# Altium footprint library TitansLib.PcbLib: 333 footprints (part 15 of 21)
Each footprint in its own frame and in the unit in brackets; x right, y up, seen from the top. Pads: shape width x height; smd on the part's side, far side on the other; paste and mask are expansions set on the pad; w line width, h text height; cw(c..) or ccw(c..) is an arc to the next point about the centre after c.
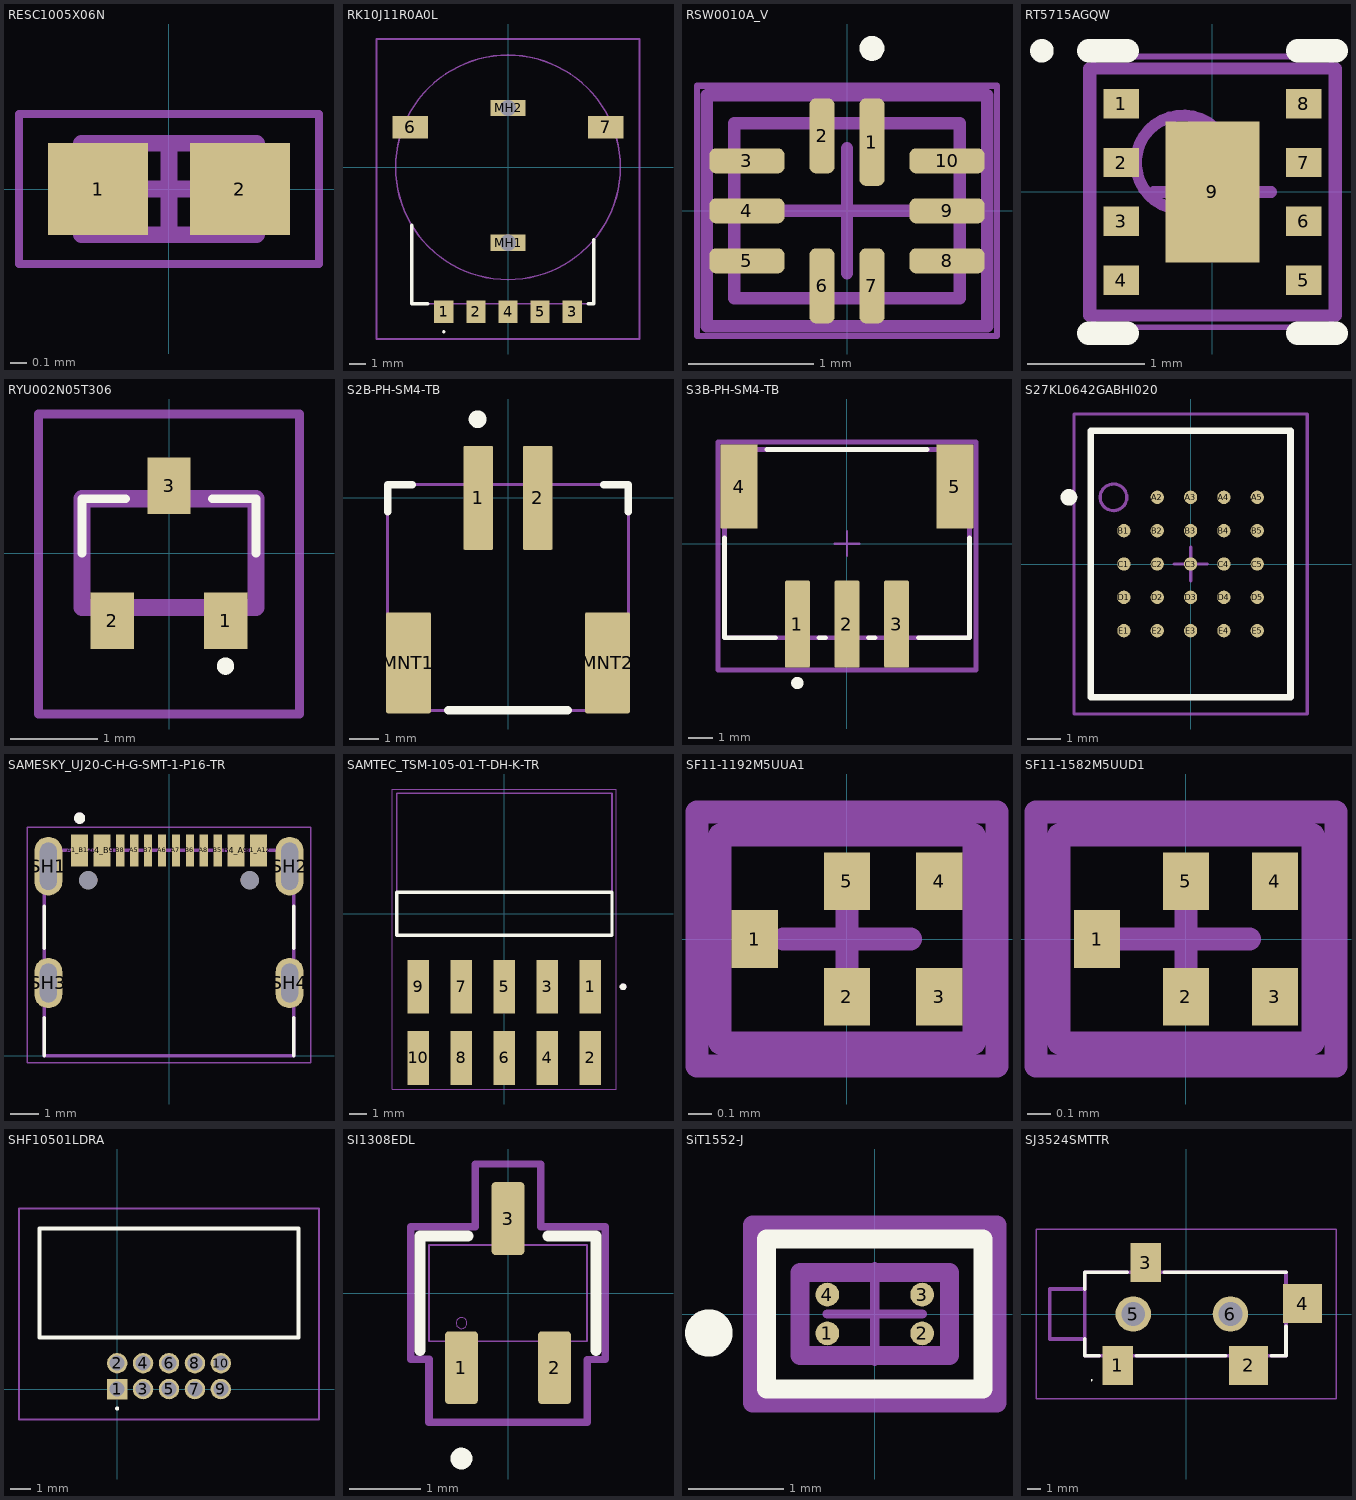
[diagram p14: the footprints below, top view; thin cyan lines are the x and y axes]

## RESC1005X06N [mm] "Chip Resistor, 2-Leads, Body 1.00x0.50mm, IPC Medium Density"
height 0.55
pads (2):
  rect 0.6x0.55 smd mask+0.05: 1(-0.425,0) 2(0.425,0)
Top Courtyard:
  lines w0.05: -0.9,-0.45 0.9,-0.45 0.9,0.45 -0.9,0.45 -0.9,-0.45
  lines w0.1: -0.275,0 0.275,0 ; 0,-0.275 0,0.275
Top Assembly:
  lines w0.1: -0.525,-0.275 0.525,-0.275 0.525,0.275 -0.525,0.275 -0.525,-0.275
3D body "RESC1005X06N.step": height 0.55, standoff 0, extent -0.525,-0.275 0.525,0.275

## RK10J11R0A0L [mm]
pads (9):
  rect 1.2x1.4 smd: 1(-4,-9) 2(-2,-9) 3(4,-9) 4(0,-9) 5(2,-9)
  rect 2.2x1.4 smd: 6(-6.1,2.5) 7(6.1,2.5)
  rect 2.2x1 hole 1 square: MH1(0,-4.7) MH2(0,3.7)
Top Overlay:
  lines w0.1: -4,-10.3 cw(c-4,-10.25) -4,-10.2 cw(c-4,-10.25) -4,-10.3
  lines w0.2: -6,-3.6 -6,-8.5 -5,-8.5 ; 5,-8.5 5.35,-8.5 5.35,-4.5
Mechanical 13:
  lines w0.1: -6,-3.6 -6,-8.5 5.35,-8.5 5.35,-4.5 ; 0,-7 ccw(c0,0) 0,7 ccw(c0,0) 0,-7
Mechanical 15:
  lines w0.1: -8.2,-10.7 8.2,-10.7 8.2,8 -8.2,8 -8.2,-10.7
3D body "RK10J11R0A0L.stp": height 2.36, standoff -0.89, extent -7,-9.6 7,6.893

## RSW0010A_V [mm] "QFN, 10-Leads, Body 1.8x1.4mm, Pitch 0.4mm, TI Recommend"
height 0.55
pads (10):
  rrect50% 0.2x0.7 smd mask+0.05: 1(0.2,0.55)
  rrect50% 0.2x0.6 smd mask+0.05: 2(-0.2,0.6) 6(-0.2,-0.6) 7(0.2,-0.6)
  rrect50% 0.6x0.2 smd mask+0.05: 3(-0.8,0.4) 4(-0.8,0) 5(-0.8,-0.4) 8(0.8,-0.4) 9(0.8,0) 10(0.8,0.4)
Top Overlay:
  circle w0.1: c0.2,1.3 r0.05
Top Assembly:
  lines w0.1: -1.123,-0.923 1.123,-0.923 1.123,0.923 -1.123,0.923 -1.123,-0.923
  text ".Designator" at -1.022,-0.24 h1
Mechanical 13:
  lines w0.1: -0.9,-0.7 -0.9,0.7 0.9,0.7 0.9,-0.7 -0.9,-0.7
Mechanical 15:
  lines w0.05: -1.2,-1 -1.2,1 1.2,1 1.2,-1 -1.2,-1
  lines w0.1: -0.5,0 0.5,0 ; 0,-0.5 0,0.5
3D body: height 0.55, standoff 0, extent -0.9,-0.7 0.9,0.7

## RT5715AGQW [mm] "PSON, 8-Leads, Body 951,05x2,00mm, Pitch 0,50mm, Thermal Pad 1,20x0,80mm, IPC High Density"
height 1
pads (9):
  rect 0.3x0.25 smd: 1(-0.775,0.75) 2(-0.775,0.25) 3(-0.775,-0.25) 4(-0.775,-0.75) 5(0.775,-0.75) 6(0.775,-0.25) 7(0.775,0.25) 8(0.775,0.75)
  rect 0.8x1.2 smd: 9(0,0)
Top Overlay:
  circle w0.1: c-1.45,1.2 r0.05
  lines w0.2: -1.05,-1.2 -0.725,-1.2 ; -1.05,1.2 -0.725,1.2 ; 0.725,-1.2 1.05,-1.2 ; 0.725,1.2 1.05,1.2
Top Courtyard:
  lines w0.05: -1.01,-1.15 -1.01,1.15 1.01,1.15 1.01,-1.15 -1.01,-1.15
  lines w0.1: -0.5,0 0.5,0 ; 0,-0.5 0,0.5
Top Assembly:
  circle w0.1: c-0.25,0.25 r0.4
  lines w0.1: -1.05,-1.05 -1.05,1.05 1.05,1.05 1.05,-1.05 -1.05,-1.05
3D body "RT5715AGQW_2.step": height 1, standoff 0, extent -1.051,-1.05 1.051,1.05

## RYU002N05T306 [mm]
pads (3):
  rect 0.5x0.65 smd: 1(0.65,-0.775) 2(-0.65,-0.775) 3(0,0.775)
Top Overlay:
  lines w0.1: -1,0 -1,0.625 -0.5,0.625 ; 0.5,0.625 1,0.625 1,0 ; 0.6,-1.3 ccw(c0.65,-1.3) 0.7,-1.3 ccw(c0.65,-1.3) 0.6,-1.3
Mechanical 13:
  lines w0.2: -1,-0.625 -1,0.625 1,0.625 1,-0.625 -1,-0.625
Mechanical 15:
  lines w0.1: -1.5,-1.85 -1.5,1.6 1.5,1.6 1.5,-1.85 -1.5,-1.85

## S2B-PH-SM4-TB [mm]
pads (4):
  rrect10% 1x3.5 smd: 1(-1,0) 2(1,0)
  rrect6% 1.5x3.4 smd: MNT1(-3.35,-5.55) MNT2(3.35,-5.55)
Top Overlay:
  circle w0.3: c-1.025,2.65 r0.15
  lines w0.25: -4.05,-0.475 -4.05,0.45 -3.225,0.45 ; 3.225,0.45 4.05,0.45 4.05,-0.475
  lines w0.3: -2,-7.15 2,-7.15
Top Courtyard:
  lines w0.1: -4.05,-7.15 4.05,-7.15 4.05,0.45 -4.05,0.45 -4.05,-7.15
3D body "S2B-PH-SM4-TB.STEP": height 5.61, standoff 0.01, extent -3.95,-7.15 3.95,1.45

## S3B-PH-SM4-TB [mm]
pads (5):
  rrect10% 1x3.5 smd paste+0 mask+0.075: 1(-2,-3.25) 2(0,-3.25) 3(2,-3.25)
  rrect6% 1.5x3.4 smd paste+0 mask+0.075: 4(-4.35,2.3) 5(4.35,2.3)
Top Overlay:
  circle w0.25: c-2,-5.625 r0.125
  lines w0.2: -4.95,0.225 -4.95,-3.8 -2.875,-3.8 ; -3.225,3.8 3.225,3.8 ; -1.125,-3.8 -0.875,-3.8 ; 0.875,-3.8 1.125,-3.8 ; 2.875,-3.8 4.95,-3.8 4.95,0.225
Top 3D Body:
  lines w0.2: -4.95,-3.8 -4.95,3.8 4.95,3.8 4.95,-3.8 -4.95,-3.8
Top Courtyard:
  lines w0.2: -5.2,-5.1 -5.2,4.1 5.2,4.1 5.2,-5.1 -5.2,-5.1
Top Component Center:
  lines w0.1: -0.5,0 0.5,0 ; 0,-0.5 0,0.5
Top Assembly:
  lines w0.2: -5.2,-5.1 -5.2,4.1 5.2,4.1 5.2,-5.1 -5.2,-5.1
3D body "Conn_JST_S3B-PH-SM4-TB_LF_SN_eec.STEP": height 0.25, standoff 0, extent -5.2,-5.1 5.2,4.1

## S27KL0642GABHI020 [mm] "BGA,1.00mm pitch,rect.;24 pin,5 columns X 5 rows,6.00mm X 8.00mm X 1.00mm H"
height 1
pads (24):
  round 0.4 smd paste+0 mask+0: A2(-1,2) A3(0,2) A4(1,2) A5(2,2) B1(-2,1) B2(-1,1) B3(0,1) B4(1,1) B5(2,1) C1(-2,0) C2(-1,0) C3(0,0) C4(1,0) C5(2,0) D1(-2,-1) D2(-1,-1) D3(0,-1) D4(1,-1) D5(2,-1) E1(-2,-2) E2(-1,-2) E3(0,-2) E4(1,-2) E5(2,-2)
Top Overlay:
  circle w0.25: c-3.65,2 r0.125
  lines w0.2: -3,-4 3,-4 3,4 -3,4 -3,-4
Mechanical 13:
  circle w0.1: c-2.313,2 r0.4
  lines w0.1: -3,-4 3,-4 3,4 -3,4 -3,-4
Mechanical 15:
  lines w0.1: -0.5,0 0.5,0 ; 0,-0.5 0,0.5 ; -3.5,-4.5 3.5,-4.5 3.5,4.5 -3.5,4.5 -3.5,-4.5
3D body "PG-BGA-24-803_002-15550_V0A_3D.stp": height 0.99, standoff -0.01, extent -3,-4 3,4

## SAMESKY_UJ20-C-H-G-SMT-1-P16-TR [mm]
height 3.46
pads (18):
  rect 0.6x1.15 smd: A1_B12(-3.2,7.345) A4_B9(-2.4,7.345) B1_A12(3.2,7.345) B4_A9(2.4,7.345)
  rect 0.3x1.15 smd: A5(-1.25,7.345) A6(-0.25,7.345) A7(0.25,7.345) A8(1.25,7.345) B5(1.75,7.345) B6(0.75,7.345) B7(-0.75,7.345) B8(-1.75,7.345)
  oval 1x2.1 hole 0.6 slot 1.7 at 90 deg: SH1(-4.32,6.78) SH2(4.32,6.78)
  oval 1x1.8 hole 0.6 slot 1.4 at 90 deg: SH3(-4.32,2.6) SH4(4.32,2.6)
  round 0.65 hole 0.65 unplated: ""(-2.89,6.28) ""(2.89,6.28)
Top Overlay:
  circle w0.2: c-3.2,8.5 r0.1
  lines w0.127: -4.47,0 -4.47,1.35 ; -4.47,3.85 -4.47,5.35 ; 4.47,0 4.47,1.35 ; 4.47,3.85 4.47,5.35
Mechanical 13:
  circle w0.2: c-3.2,8.5 r0.1
  lines w0.127: -4.47,0 -4.47,7.35 4.47,7.35 4.47,0 -4.47,0
Mechanical 15:
  lines w0.05: -5.07,-0.25 -5.07,8.17 5.07,8.17 5.07,-0.25 -5.07,-0.25
3D body "step_temp.STEP": height 3.31, standoff -0.96, extent -4.47,0 4.47,7.6

## SAMTEC_TSM-105-01-T-DH-K-TR [mm]
pads (10):
  rect 1.27x3.18 smd: 1(5.08,-4.305) 2(5.08,-8.495) 3(2.54,-4.305) 4(2.54,-8.495) 5(0,-4.305) 6(0,-8.495) 7(-2.54,-4.305) 8(-2.54,-8.495) 9(-5.08,-4.305) 10(-5.08,-8.495)
Top Overlay:
  circle w0.2: c7,-4.305 r0.1
  lines w0.2: -6.35,-1.27 6.35,-1.27 6.35,1.27 -6.35,1.27 -6.35,-1.27
Mechanical 13:
  circle w0.2: c7,-4.305 r0.1
  lines w0.1: -6.35,-1.27 -6.35,7.11 6.35,7.11 6.35,-1.27 ; -6.35,-1.27 6.35,-1.27 ; -6.35,-1.27 -6.35,1.27 6.35,1.27 6.35,-1.27
Mechanical 15:
  lines w0.05: -6.6,-10.335 6.6,-10.335 6.6,7.36 -6.6,7.36 -6.6,-10.335
3D body "TSM-105-01-L-DH-LC-K-TR.stp": height 6.2, standoff -1.42, extent -6.35,-9.144 6.35,7.112

## SF11-1192M5UUA1 [mm]
pads (5):
  rect 0.2x0.25 smd mask+0.05: 1(-0.4,0) 2(0,-0.25) 3(0.4,-0.25) 4(0.4,0.25) 5(0,0.25)
Top Courtyard:
  lines w0.1: -0.275,0 0.275,0 ; 0,-0.275 0,0.275 ; -0.65,-0.55 -0.65,0.55 0.65,0.55 0.65,-0.55 -0.65,-0.55
Top Assembly:
  lines w0.1: -0.55,-0.45 -0.55,0.45 0.55,0.45 0.55,-0.45 -0.55,-0.45

## SF11-1582M5UUD1 [mm]
pads (5):
  rect 0.2x0.25 smd mask+0.05: 1(-0.385,0) 2(0,-0.25) 3(0.385,-0.25) 4(0.385,0.25) 5(0,0.25)
Top Courtyard:
  lines w0.1: -0.275,0 0.275,0 ; 0,-0.275 0,0.275 ; -0.65,-0.55 -0.65,0.55 0.65,0.55 0.65,-0.55 -0.65,-0.55
Top Assembly:
  lines w0.1: -0.55,-0.45 -0.55,0.45 0.55,0.45 0.55,-0.45 -0.55,-0.45

## SHF10501LDRA [mm]
pads (10):
  rect 1x1 hole 0.74: 1(0,0)
  round 1 hole 0.74: 2(0,1.27) 3(1.27,0) 4(1.27,1.27) 5(2.54,0) 6(2.54,1.27) 7(3.81,0) 8(3.81,1.27) 9(5.08,0) 10(5.08,1.27)
Top Overlay:
  lines w0.1: 0,-1 cw(c0,-0.95) 0,-0.9 cw(c0,-0.95) 0,-1
  lines w0.2: -3.81,2.53 -3.81,7.86 8.89,7.86 8.89,2.53 -3.81,2.53
Mechanical 13:
  lines w0.1: -3.81,2.53 -3.81,7.86 8.89,7.86 8.89,2.53 -3.81,2.53
Mechanical 15:
  lines w0.1: -4.81,-1.5 -4.81,8.86 9.89,8.86 9.89,-1.5 -4.81,-1.5
3D body "SHF-105-01-L-D-RA.stp": height 5.48, standoff -2.27, extent -3.81,-0.163 8.89,7.914

## SI1308EDL [mil]
pads (3):
  rrect21% 18x40 smd paste+0 mask+0: 1(-25.59,-41) 2(25.59,-41) 3(0,41)
Top Overlay:
  circle w6: c-25.59,-91 r3
  lines w6: -48.5,-31.5 -48.5,31.5 -22.1,31.5 ; 22.1,31.5 48.5,31.5 48.5,-31.5
Top Assembly:
  lines w3.94: -53.5,-36.28 -43.35,-36.28 -43.35,-71 43.68,-71 43.68,-36.5 53.5,-36.5 53.5,36.56 18,36.56 18,71 -18,71 -18,36.5 -53.5,36.5 -53.5,-36.28
Mechanical 13:
  circle w0: c-25.59,-16.5 r3
  lines w1: -43.5,-26.5 -43.5,26.5 43.5,26.5 43.5,-26.5 -43.5,-26.5 ; -33.59,-47 -17.59,-47 -17.59,-26.5 -33.59,-26.5 -33.59,-47 ; -8,26.5 -8,47 8,47 8,26.5 -8,26.5 ; 17.59,-47 33.59,-47 33.59,-26.5 17.59,-26.5 17.59,-47
Mechanical 15:
  lines w3.94: -53.5,-36.5 -43.59,-36.5 -43.59,-71 43.59,-71 43.59,-36.5 53.5,-36.5 53.5,36.5 18,36.5 18,71 -18,71 -18,36.5 -53.5,36.5 -53.5,-36.5
3D body "MOSFET_8EDL-T1-GE3_VIS.step": height 39.09, standoff 0, extent -43.5,-47.01 43.5,47.01

## SiT1552-J [mm]
pads (4):
  round 0.25 smd paste+0 mask-1000: 1(-0.5,-0.205) 2(0.5,-0.205) 3(0.5,0.205) 4(-0.5,0.205)
Top Overlay:
  circle w0.25: c-1.75,-0.2 r0.125
  lines w0.2: -1.14,-0.79 -1.14,0.79 1.14,0.79 1.14,-0.79 -1.14,-0.79
Top Solder:
  circle w0.175: c0.5,0.205 r0.088
  circle w0.175: c-0.5,0.205 r0.088
  circle w0.175: c0.5,-0.205 r0.088
  circle w0.175: c-0.5,-0.205 r0.088
Top 3D Body:
  lines w0.2: -0.79,-0.44 -0.79,0.44 0.79,0.44 0.79,-0.44 -0.79,-0.44
Top Courtyard:
  lines w0.2: -1.29,-0.94 1.29,-0.94 1.29,0.94 -1.29,0.94 -1.29,-0.94
Top Component Center:
  lines w0.1: -0.5,0 0.5,0 ; 0,-0.5 0,0.5
Top Assembly:
  lines w0.2: -1.29,-0.94 1.29,-0.94 1.29,0.94 -1.29,0.94 -1.29,-0.94
3D body "Crys_SiTime_SIT1552AI-JE-DCC-32_768S_eec.STEP": height 0.25, standoff 0, extent -1.29,-0.94 1.29,0.94

## SJ3524SMTTR [mm]
pads (6):
  rect 2.2x2.8 smd: 1(-4.9,-3.7) 3(-2.9,3.7)
  rect 2.8x2.8 smd: 2(4.5,-3.7) 4(8.4,0.75)
  round 2.55 hole 1.7: 5(-3.8,0) 6(3.2,0)
Top Overlay:
  lines w0.072: -6.825,-4.76 ccw(c-6.789,-4.76) -6.753,-4.76 ccw(c-6.789,-4.76) -6.825,-4.76
  lines w0.254: -7.3,-1.8 -7.3,-3 -6.237,-3 ; -7.3,1.8 -7.3,3 -4.24,3 ; -3.575,-3 2.868,-3 ; -1.55,3 7.2,3 ; 6.139,-3 7.2,-3 7.2,-0.88
Mechanical 13:
  lines w0.254: -7.3,-1.8 -9.8,-1.8 -9.8,1.8 -7.3,1.8 ; -7.3,-3 7.2,-3 7.2,3 -7.3,3 -7.3,-3
Mechanical 15:
  lines w0.1: -10.8,-6.1 10.8,-6.1 10.8,6.1 -10.8,6.1 -10.8,-6.1
3D body "SJ-3524-SMT-TR.stp": height 5.05, standoff -0.75, extent -9.86,-4.5 9.14,4.5